# Altium footprint library 1.40-晶振、晶体.PcbLib: 43 footprints (part 3 of 3)
Each footprint in its own frame and in the unit in brackets; x right, y up, seen from the top. Pads: shape width x height; smd on the part's side, far side on the other; paste and mask are expansions set on the pad; w line width, h text height; cw(c..) or ccw(c..) is an arc to the next point about the centre after c.
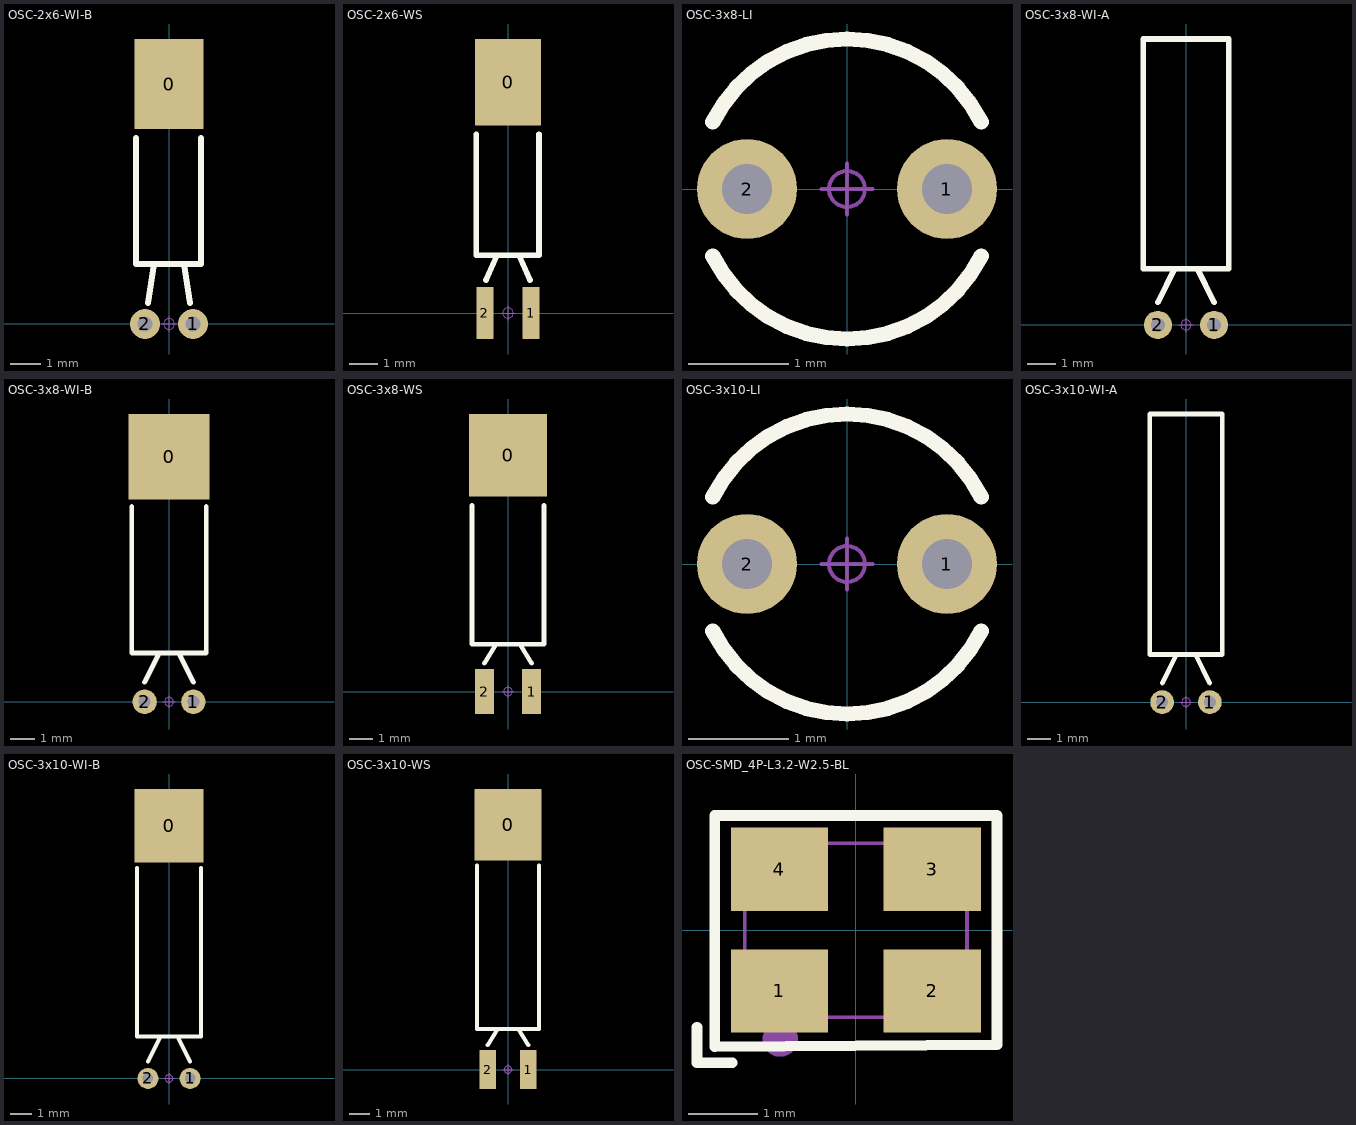
[diagram p2: the footprints below, top view; thin cyan lines are the x and y axes]

## OSC-2x6-WI-B [mm] "脚距：1.6mm                   封装库来自淘宝卖家 ID：黄晶宝石"
pads (3):
  rect 2.3x3 smd: 0(0,8)
  round 1 hole 0.5: 1(0.8,0) 2(-0.8,0)
Top Overlay:
  lines w0.2: -1.1,6.2 -1.1,2 1.072,2 1.072,6.2 ; -0.7,0.7 -0.5,2 ; 0.5,2 0.7,0.7
Mechanical 15:
  circle w0.04: c0,0 r0.18
  lines w0.04: -0.254,0 0.254,0 ; 0,-0.254 0,0.254
3D body "OSC-2x6-WI.STEP": height 2.05, standoff -2.6, extent -1,-0.157 1,8

## OSC-2x6-WS [mm] "脚距：1.6mm"
pads (3):
  rect 2.3x3 smd: 0(0,8)
  rect 0.6x1.8 smd: 1(0.8,0) 2(-0.8,0)
Top Overlay:
  lines w0.2: -1.1,6.2 -1.1,2 1.072,2 1.072,6.2 ; -0.762,1.143 -0.381,2 ; 0.381,2 0.762,1.143
Mechanical 15:
  circle w0.04: c0,0 r0.18
  lines w0.04: -0.254,0 0.254,0 ; 0,-0.254 0,0.254
3D body "OSC-2x6-WS.STEP": height 2.01, standoff -0.04, extent -1,-0.601 1,8

## OSC-3x8-LI [mm] "脚距：2mm                  封装库来自淘宝卖家 ID：黄晶宝石"
pads (2):
  round 1 hole 0.5: 1(1,0) 2(-1,0)
Top Overlay:
  lines w0.152: -1.342,-0.671 ccw(c0,0) 1.342,-0.671 ; -1.342,0.671 cw(c0,0) 1.342,0.671
Mechanical 15:
  circle w0.04: c0,0 r0.18
  lines w0.04: -0.254,0 0.254,0 ; 0,-0.254 0,0.254
3D body "OSC-3x8-LI.STEP": height 9.1, standoff -2.5, extent -1.5,-1.5 1.5,1.5

## OSC-3x8-WI-A [mm] "脚距：2mm         封装库来自淘宝卖家 ID：黄晶宝石"
pads (2):
  round 1 hole 0.5: 1(1,0) 2(-1,0)
Top Overlay:
  lines w0.2: -1,0.8 -0.4,2 ; 0.4,2 1,0.8 ; -1.524,2 1.524,2 1.524,10.16 -1.524,10.16 -1.524,2
Mechanical 15:
  circle w0.04: c0,0 r0.18
  lines w0.04: -0.254,0 0.254,0 ; 0,-0.254 0,0.254
3D body "OSC-3x8-WI.STEP": height 3.03, standoff -2.6, extent -1.5,-0.179 1.5,10

## OSC-3x8-WI-B [mm] "脚距：2mm            封装库来自淘宝卖家 ID：黄晶宝石"
pads (3):
  rect 3.3x3.5 smd: 0(0,10.033)
  round 1 hole 0.5: 1(1,0) 2(-1,0)
Top Overlay:
  lines w0.2: -1.524,8.001 -1.524,2 1.524,2 1.524,8.001 ; -1,0.8 -0.4,2 ; 0.4,2 1,0.8
Mechanical 15:
  circle w0.04: c0,0 r0.18
  lines w0.04: -0.254,0 0.254,0 ; 0,-0.254 0,0.254
3D body "OSC-3x8-WI.STEP": height 3.03, standoff -2.6, extent -1.5,-0.179 1.5,10

## OSC-3x8-WS [mm] "脚距：2mm    封装库来自淘宝卖家 ID：黄晶宝石"
pads (3):
  rect 3.3x3.5 smd: 0(0,10)
  rect 0.8x1.9 smd: 1(1,0) 2(-1,0)
Top Overlay:
  lines w0.2: -1.524,7.874 -1.524,2 1.524,2 1.524,7.874 ; -1,1.2 -0.5,2 ; 0.5,2 1,1.2
Mechanical 15:
  circle w0.04: c0,0 r0.18
  lines w0.04: -0.254,0 0.254,0 ; 0,-0.254 0,0.254
3D body "OSC-3x8-WS.STEP": height 3.03, standoff 0, extent -1.5,-0.501 1.5,10

## OSC-3x10-LI [mm] "脚距：2mm"
pads (2):
  round 1 hole 0.5: 1(1,0) 2(-1,0)
Top Overlay:
  lines w0.152: -1.342,-0.671 ccw(c0,0) 1.342,-0.671 ; -1.342,0.671 cw(c0,0) 1.342,0.671
Mechanical 15:
  circle w0.04: c0,0 r0.18
  lines w0.04: -0.254,0 0.254,0 ; 0,-0.254 0,0.254
3D body "OSC-3x10-LI.STEP": height 11.1, standoff -2.5, extent -1.5,-1.5 1.5,1.5

## OSC-3x10-WI-A [mm] "脚距：2mm"
pads (2):
  round 1 hole 0.5: 1(1,0) 2(-1,0)
Top Overlay:
  lines w0.2: -1,0.8 -0.4,2 ; 0.4,2 1,0.8 ; -1.524,2 1.524,2 1.524,12.1 -1.524,12.1 -1.524,2
Mechanical 15:
  circle w0.04: c0,0 r0.18
  lines w0.04: -0.254,0 0.254,0 ; 0,-0.254 0,0.254
3D body "OSC-3x10-WI.STEP": height 3.03, standoff -2.6, extent -1.5,-0.179 1.5,12

## OSC-3x10-WI-B [mm] "脚距：2mm"
pads (3):
  rect 3.3x3.5 smd: 0(0,12)
  round 1 hole 0.5: 1(1,0) 2(-1,0)
Top Overlay:
  lines w0.2: -1.524,10 -1.524,2 1.524,2 1.524,10 ; -1,0.8 -0.4,2 ; 0.4,2 1,0.8
Mechanical 15:
  circle w0.04: c0,0 r0.18
  lines w0.04: -0.254,0 0.254,0 ; 0,-0.254 0,0.254
3D body "OSC-3x10-WI.STEP": height 3.03, standoff -2.6, extent -1.5,-0.179 1.5,12

## OSC-3x10-WS [mm] "脚距：2mm"
pads (3):
  rect 3.3x3.5 smd: 0(0,12)
  rect 0.8x1.9 smd: 1(1,0) 2(-1,0)
Top Overlay:
  lines w0.2: -1.524,10 -1.524,2 1.524,2 1.524,10 ; -1,1.2 -0.5,2 ; 0.5,2 1,1.2
Mechanical 15:
  circle w0.04: c0,0 r0.18
  lines w0.04: -0.254,0 0.254,0 ; 0,-0.254 0,0.254
3D body "OSC-3x10-WS.STEP": height 3.03, standoff 0, extent -1.5,-0.501 1.5,12

## OSC-SMD_4P-L3.2-W2.5-BL [mm]
pads (4):
  rect 1.4x1.2 smd: 1(-1.1,-0.875) 2(1.1,-0.875) 3(1.1,0.875) 4(-1.1,0.875)
Top Overlay:
  lines w0.152: -2.286,-1.397 -2.286,-1.905 -1.778,-1.905 ; -2.029,-1.679 2.032,-1.651 2.032,0 2.032,1.651 -2.029,1.651 -2.029,-1.679
Mechanical 6:
  circle w0.254: c-1.088,-1.567 r0.127
  region: -1.738,-0.536 -1.702,-0.536 -1.702,-0.608 -1.738,-0.608
  region: -1.702,-0.536 -1.666,-0.536 -1.666,-0.608 -1.702,-0.608
  region: -1.666,-0.5 -1.63,-0.5 -1.63,-0.608 -1.666,-0.608
  region: -1.63,-0.464 -1.594,-0.464 -1.594,-0.572 -1.63,-0.572
  region: -1.594,-0.464 -1.558,-0.464 -1.558,-1.004 -1.594,-1.004
  region: -1.558,-0.428 -1.522,-0.428 -1.522,-1.004 -1.558,-1.004
  region: -1.522,-0.428 -1.486,-0.428 -1.486,-1.004 -1.522,-1.004
  region: -1.486,-0.428 -1.45,-0.428 -1.45,-1.004 -1.486,-1.004
Mechanical 15:
  region: 0.6,-0.449 1.5,-0.449 1.5,-1.249 0.6,-1.249
  region: -1.5,-0.449 -0.6,-0.449 -0.6,-1.249 -1.5,-1.249
  region: -1.5,1.249 -0.6,1.249 -0.6,0.449 -1.5,0.449
  region: 0.6,1.249 1.5,1.249 1.5,0.449 0.6,0.449
  region: -1.54,-1.25 -1.54,-1.225 -1.575,-1.191 -1.624,-1.191 -1.659,-1.225 -1.66,-1.25 -1.659,-1.274 -1.624,-1.309 -1.576,-1.309 -1.541,-1.274 -1.54,-1.25
  lines w0.051: -1.6,-1.25 1.6,-1.25 1.6,1.25 -1.6,1.25 -1.6,-1.25
3D body "NlYB-X2-CRYSTAL-SMD_4P-L3.2-W2.5-BL jz.STEP": height 0.8, standoff -0.01, extent -1.6,-1.25 1.6,1.25